# Altium footprint library 2×5P插针.PcbLib: 1 footprints
Each footprint in its own frame and in the unit in brackets; x right, y up, seen from the top. Pads: shape width x height; smd on the part's side, far side on the other; paste and mask are expansions set on the pad; w line width, h text height; cw(c..) or ccw(c..) is an arc to the next point about the centre after c.
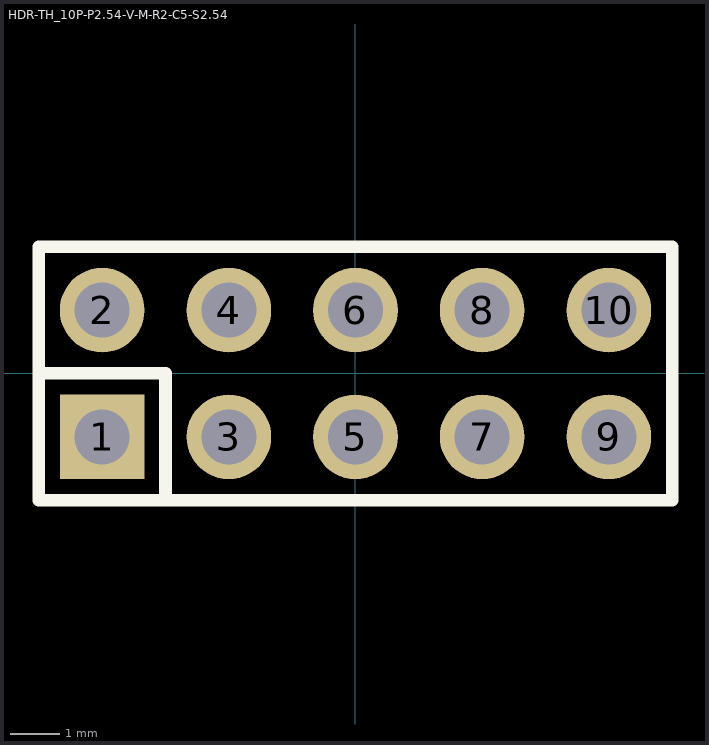
[diagram p0: the footprint, top view; thin cyan lines are the x and y axes]

## HDR-TH_10P-P2.54-V-M-R2-C5-S2.54 [mm]
pads (10):
  rect 1.7x1.7 hole 1.1: 1(-5.08,-1.27)
  round 1.7 hole 1.1: 2(-5.08,1.27) 3(-2.54,-1.27) 4(-2.54,1.27) 5(0,-1.27) 6(0,1.27) 7(2.54,-1.27) 8(2.54,1.27) 9(5.08,-1.27) 10(5.08,1.27)
Top Overlay:
  lines w0.254: -6.35,0 -3.81,0.007 -3.81,-2.54 ; -6.35,-2.54 -6.35,2.54 6.35,2.54 6.35,-2.54 -6.35,-2.54
Mechanical 6:
  lines w0.051: -6.35,-2.5 6.35,-2.5 6.35,2.5 -6.35,2.5 -6.35,-2.5
Mechanical 8:
  region: -6.29,-2.5 -6.29,-2.525 -6.325,-2.56 -6.375,-2.56 -6.41,-2.525 -6.41,-2.5 -6.41,-2.475 -6.375,-2.44 -6.325,-2.44 -6.29,-2.475 -6.29,-2.5
Mechanical 9:
  region: 4.76,-0.95 5.4,-0.95 5.4,-1.59 4.76,-1.59
  region: 4.76,1.59 5.4,1.59 5.4,0.95 4.76,0.95
  region: 2.22,-0.95 2.86,-0.95 2.86,-1.59 2.22,-1.59
  region: 2.22,1.59 2.86,1.59 2.86,0.95 2.22,0.95
  region: -0.32,-0.95 0.32,-0.95 0.32,-1.59 -0.32,-1.59
  region: -0.32,1.59 0.32,1.59 0.32,0.95 -0.32,0.95
  region: -2.86,-0.95 -2.22,-0.95 -2.22,-1.59 -2.86,-1.59
  region: -2.86,1.59 -2.22,1.59 -2.22,0.95 -2.86,0.95
  region: -5.4,-0.95 -4.76,-0.95 -4.76,-1.59 -5.4,-1.59
  region: -5.4,1.59 -4.76,1.59 -4.76,0.95 -5.4,0.95